# Altium schematic symbol library 73096-0.SchLib: 1 symbol
Pins are listed as number, name and electrical type; pins without a type are passive.

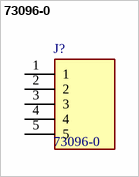
[diagram p0: symbol 73096-0]

## 73096-0
designator J?
Test Plugs & Test Jacks INLINE 4mm SAFETY JACK PBC MOUNT BLACK; Manufacturer_Name: Pomona Electronics; Geometry.Height: 27.25mm; Mouser Part Number: 565-73096-0; Mouser Price/Stock: https://www.mouser.co.uk/ProductDetail/Pomona-Electronics/73096-0?qs=B6kkDfuK7%2FCHZUOBpaT9IA%3D%3D; Manufacturer_Part_Number: 73096-0; Datasheet Link: https://www.pomonaelectronics.com/sites/default/files/d73096_101_0.pdf
footprint 730960
pins: 1 (power), 2 (power), 3 (power), 4 (power), 5 (power)